# Altium schematic symbol library MH_M3.SchLib: 1 symbol
Pins are listed as number, name and electrical type; pins without a type are passive.

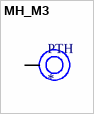
[diagram p0: symbol MH_M3]

## MH_M3
designator PTH
footprint PCBComponent_1
pins: 1